# Altium footprint library ARJM11C7009ABEW2.PcbLib: 1 footprints
Each footprint in its own frame and in the unit in brackets; x right, y up, seen from the top. Pads: shape width x height; smd on the part's side, far side on the other; paste and mask are expansions set on the pad; w line width, h text height; cw(c..) or ccw(c..) is an arc to the next point about the centre after c.
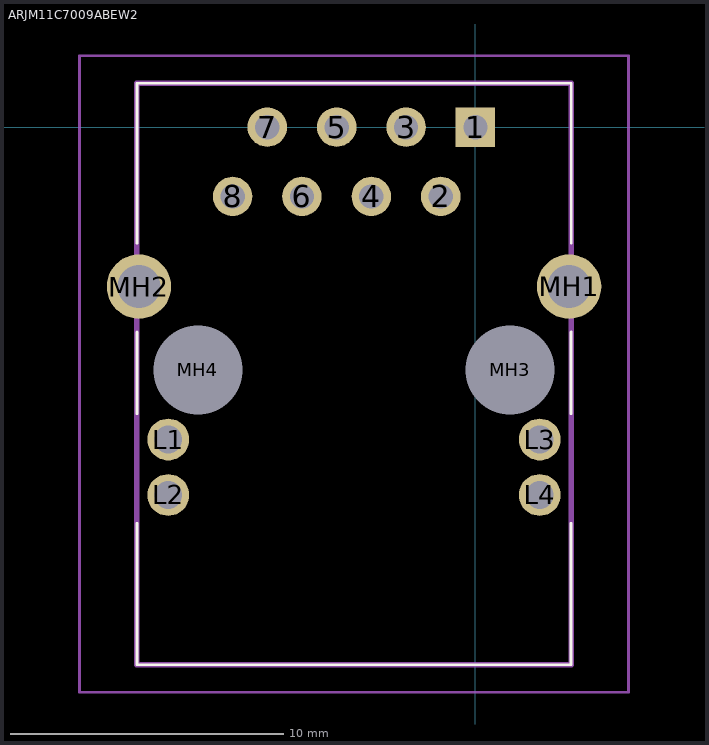
[diagram p0: the footprint, top view; thin cyan lines are the x and y axes]

## ARJM11C7009ABEW2 [mm]
pads (16):
  rect 1.446x1.446 hole 0.89: 1(0,0)
  round 1.446 hole 0.89: 2(-1.27,-2.54) 3(-2.54,0) 4(-3.81,-2.54) 5(-5.08,0) 6(-6.35,-2.54) 7(-7.62,0) 8(-8.89,-2.54)
  round 1.53 hole 1.02: L1(-11.245,-11.44) L2(-11.245,-13.47) L3(2.355,-11.44) L4(2.355,-13.47)
  round 2.355 hole 1.57: MH1(3.43,-5.84) MH2(-12.32,-5.84)
  round 1.625 hole 3.25 unplated: MH3(1.27,-8.89) MH4(-10.16,-8.89)
Top Overlay:
  lines w0.1: -12.395,-19.69 3.5,-19.69 ; -12.395,-19.69 -12.395,-19.69 ; -12.395,-19.69 3.5,-19.69 ; -12.395,-19.69 -12.395,-19.69 ; -12.395,-19.69 -12.395,-14.5 ; -12.395,-19.69 -12.395,-14.5 ; -12.395,-14.5 -12.395,-14.5 ; -12.395,-10.5 -12.395,-10.5 ; -12.395,-10.5 -12.395,-7.5 ; -12.395,-10.5 -12.395,-7.5 ; -12.395,-7.5 -12.395,-7.5 ; -12.395,-4.25 -12.395,-4.25 ; -12.395,-4.25 -12.395,1.61 ; -12.395,-4.25 -12.395,1.61 ; -12.395,1.61 -12.395,1.61 ; -12.395,1.61 3.505,1.61 ; -12.395,1.61 3.505,1.61 ; -12.395,1.61 -12.395,1.61 ; 3.5,-19.69 3.5,-14.5 3.505,-14.5 3.505,-19.69 3.5,-19.69 ; 3.5,-19.69 3.5,-19.69 ; 3.505,-4.25 3.505,1.61 ; 3.505,-4.25 3.505,-4.25 ; 3.505,-4.25 3.505,1.61 ; 3.505,1.61 3.505,1.61 ; 3.505,1.61 3.505,1.61 ; 3.5,-10.5 3.5,-7.5 3.505,-7.5 3.505,-10.5 3.5,-10.5
Mechanical 15:
  lines w0.2: -12.395,-19.69 3.505,-19.69 3.505,1.61 -12.395,1.61 -12.395,-19.69
Mechanical 20:
  lines w0.1: -14.498,-20.69 5.607,-20.69 5.607,2.61 -14.498,2.61 -14.498,-20.69